# Altium integrated library ERA2AED161X.IntLib: 1 symbol
Pins are listed as number, name and electrical type; pins without a type are passive.

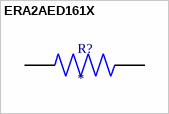
[diagram p0: symbol ERA2AED161X]

## ERA2AED161X
designator R?
MP: ERA2AED161X; Price: None; Package: None; Value: *; Availability: Unavailable
footprint RES_ERA2AED161X
pins: 1, 2